# Altium footprint library STPST10H100SBYTR.PcbLib: 3 footprints
Each footprint in its own frame and in the unit in brackets; x right, y up, seen from the top. Pads: shape width x height; smd on the part's side, far side on the other; paste and mask are expansions set on the pad; w line width, h text height; cw(c..) or ccw(c..) is an arc to the next point about the centre after c.
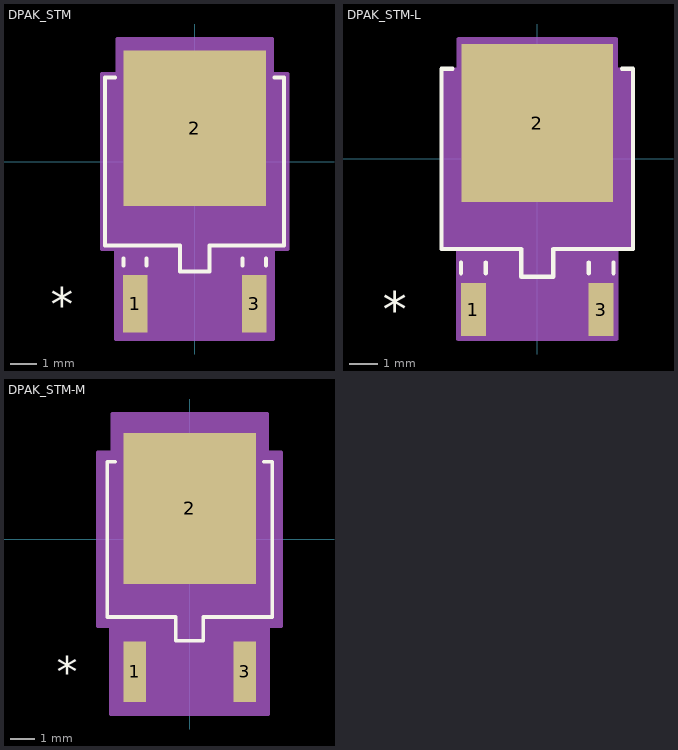
[diagram p0: the footprints below, top view; thin cyan lines are the x and y axes]

## DPAK_STM [mil]
pads (3):
  rect 36.97x86.56 smd paste+0 mask+0: 1(-90,-214.5) 3(90,-214.5)
  rect 215x235 smd paste+0 mask+0: 2(0,50.5)
Top Overlay:
  lines w6: -120.6,127 -135,127 -135,-127 -22.5,-127 -22.5,-166 22.5,-166 22.5,-127 135,-127 135,127 120.6,127 ; -107.5,-157.22 -107.5,-146 ; -72.5,-157.22 -72.5,-146 ; 72.5,-157.22 72.5,-146 ; 107.5,-157.22 107.5,-146
  text ".Designator" at -137.5,-25 h50
  text "*" at -217.5,-239.5 h50
Mechanical 13:
  lines w1: -130,-122 130,-122 130,122 -130,122 -130,-122 ; -107.5,-244 -107.5,-122 -72.5,-122 -72.5,-244 -107.5,-244 ; -17.5,-161 -17.5,-122 17.5,-122 17.5,-161 -17.5,-161 ; 72.5,-244 72.5,-122 107.5,-122 107.5,-244 72.5,-244
  text "*" at -102.5,-137 h50
  text ".Designator" at -137.5,-25 h50
Mechanical 15:
  region: -140,-132 -140,132 -116.5,132 -116.5,185 116.5,185 116.5,132 140,132 140,-132 118.48,-132 118.48,-267.78 -118.48,-267.78 -118.48,-132
  lines w6: -140,-132 -140,132 -116.5,132 -116.5,185 116.5,185 116.5,132 140,132 140,-132 118.48,-132 118.48,-267.78 -118.48,-267.78 -118.48,-132 -140,-132
3D body "DPAK_STM.step": height 94.09, standoff -2.01, extent -130,-244.02 130,154.02

## DPAK_STM-L [mil]
pads (3):
  rect 35x74.75 smd paste+0 mask+0: 1(-90,-212.53) 3(90,-212.53)
  rect 213x223 smd paste+0 mask+0: 2(0,50.5)
Top Overlay:
  lines w6: -119.6,127 -135,127 -135,-127 -22.5,-127 -22.5,-166 22.5,-166 22.5,-127 135,-127 135,127 119.6,127 ; -107.5,-161.16 -107.5,-146 ; -72.5,-161.16 -72.5,-146 ; 72.5,-161.16 72.5,-146 ; 107.5,-161.16 107.5,-146
  text ".Designator" at -137.5,-25 h50
  text "*" at -217.5,-237.53 h50
Mechanical 13:
  lines w1: -130,-122 130,-122 130,122 -130,122 -130,-122 ; -107.5,-244 -107.5,-122 -72.5,-122 -72.5,-244 -107.5,-244 ; -17.5,-161 -17.5,-122 17.5,-122 17.5,-161 -17.5,-161 ; 72.5,-244 72.5,-122 107.5,-122 107.5,-244 72.5,-244
  text "*" at -102.5,-137 h50
  text ".Designator" at -137.5,-25 h50
Mechanical 15:
  region: -134,-126 -134,126 -110.5,126 -110.5,169 110.5,169 110.5,126 134,126 134,-126 111.5,-126 111.5,-253.91 -111.5,-253.91 -111.5,-126
  lines w6: -134,-126 -134,126 -110.5,126 -110.5,169 110.5,169 110.5,126 134,126 134,-126 111.5,-126 111.5,-253.91 -111.5,-253.91 -111.5,-126 -134,-126
3D body "DPAK_STM.step": height 94.09, standoff -2.01, extent -130,-244.02 130,154.02

## DPAK_STM-M [mil]
pads (3):
  rect 36.97x98.37 smd paste+0 mask+0: 1(-90,-216.47) 3(90,-216.47)
  rect 217x247 smd paste+0 mask+0: 2(0,50.5)
Top Overlay:
  lines w6: -121.6,127 -135,127 -135,-127 -22.5,-127 -22.5,-166 22.5,-166 22.5,-127 135,-127 135,127 121.6,127
  text ".Designator" at -137.5,-25 h50
  text "*" at -217.5,-241.47 h50
Mechanical 13:
  lines w1: -130,-122 130,-122 130,122 -130,122 -130,-122 ; -107.5,-244 -107.5,-122 -72.5,-122 -72.5,-244 -107.5,-244 ; -17.5,-161 -17.5,-122 17.5,-122 17.5,-161 -17.5,-161 ; 72.5,-244 72.5,-122 107.5,-122 107.5,-244 72.5,-244
  text "*" at -102.5,-137 h50
  text ".Designator" at -137.5,-25 h50
Mechanical 15:
  region: -150,-142 -150,142 -126.5,142 -126.5,205 126.5,205 126.5,142 150,142 150,-142 128.48,-142 128.48,-285.65 -128.48,-285.65 -128.48,-142
  lines w6: -150,-142 -150,142 -126.5,142 -126.5,205 126.5,205 126.5,142 150,142 150,-142 128.48,-142 128.48,-285.65 -128.48,-285.65 -128.48,-142 -150,-142
3D body "DPAK_STM.step": height 94.09, standoff -2.01, extent -130,-244.02 130,154.02